# EAGLE library part CES-0402MC (library CES-0402MC)
DIP Switches / SIP Switches OFF-ON 4 position DIP switch, raised actuator, straight PC terminals, 100mA @ 6V DC, magazine packaging Source: Datasheet <https://www.nidec-copal-electronics.com/e/catalog/switch/ces.pdf>
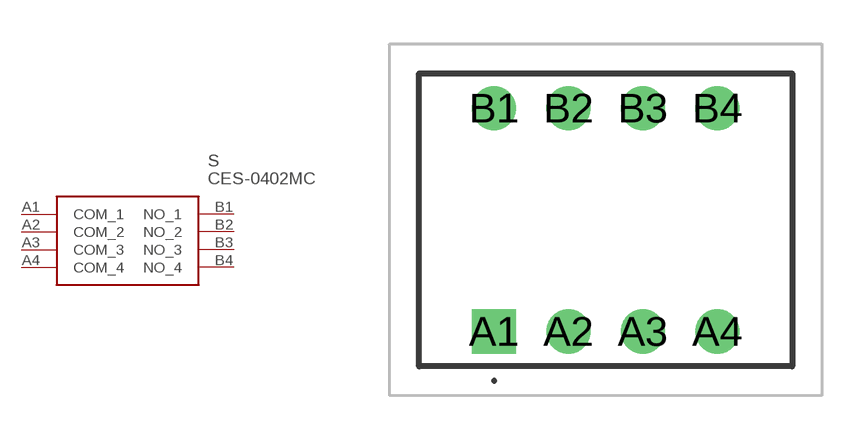
[diagram p0: symbol with the pads of CES0402MC; footprint CES0402MC]

Designator prefix S

## CES-0402MC (Description: DIP Switches / SIP Switches OFF-ON 4 position DIP switch, raised actuator, straight PC terminals, 100mA @ 6V DC, magazine packaging; Height: 12.3mm; Manufacturer_Name: Nidec Copal; Manufacturer_Part_Number: CES-0402MC; Mouser_Part_Number: 229-CES-0402MC; Mouser_Price-Stock: https://www.mouser.co.uk/ProductDetail/Nidec-Components/CES-0402MC?qs=XeJtXLiO41Q05topIs8SoQ%3D%3D)  [CES0402MC]
A1  COM_1
A2  COM_2
A3  COM_3
A4  COM_4
B1  NO_1
B2  NO_2
B3  NO_3
B4  NO_4

## Footprint CES0402MC (pad centres in mm)
CES-0402MC-2
drill 1 pad 1.5 square: A1 0,0
drill 1 pad 1.5: A2 2.54,0; A3 5.08,0; A4 7.62,0; B1 0,7.62; B2 2.54,7.62; B3 5.08,7.62; B4 7.62,7.62